# Altium footprint library Propia.PcbLib: 378 footprints (part 2 of 24)
Each footprint in its own frame and in the unit in brackets; x right, y up, seen from the top. Pads: shape width x height; smd on the part's side, far side on the other; paste and mask are expansions set on the pad; w line width, h text height; cw(c..) or ccw(c..) is an arc to the next point about the centre after c.
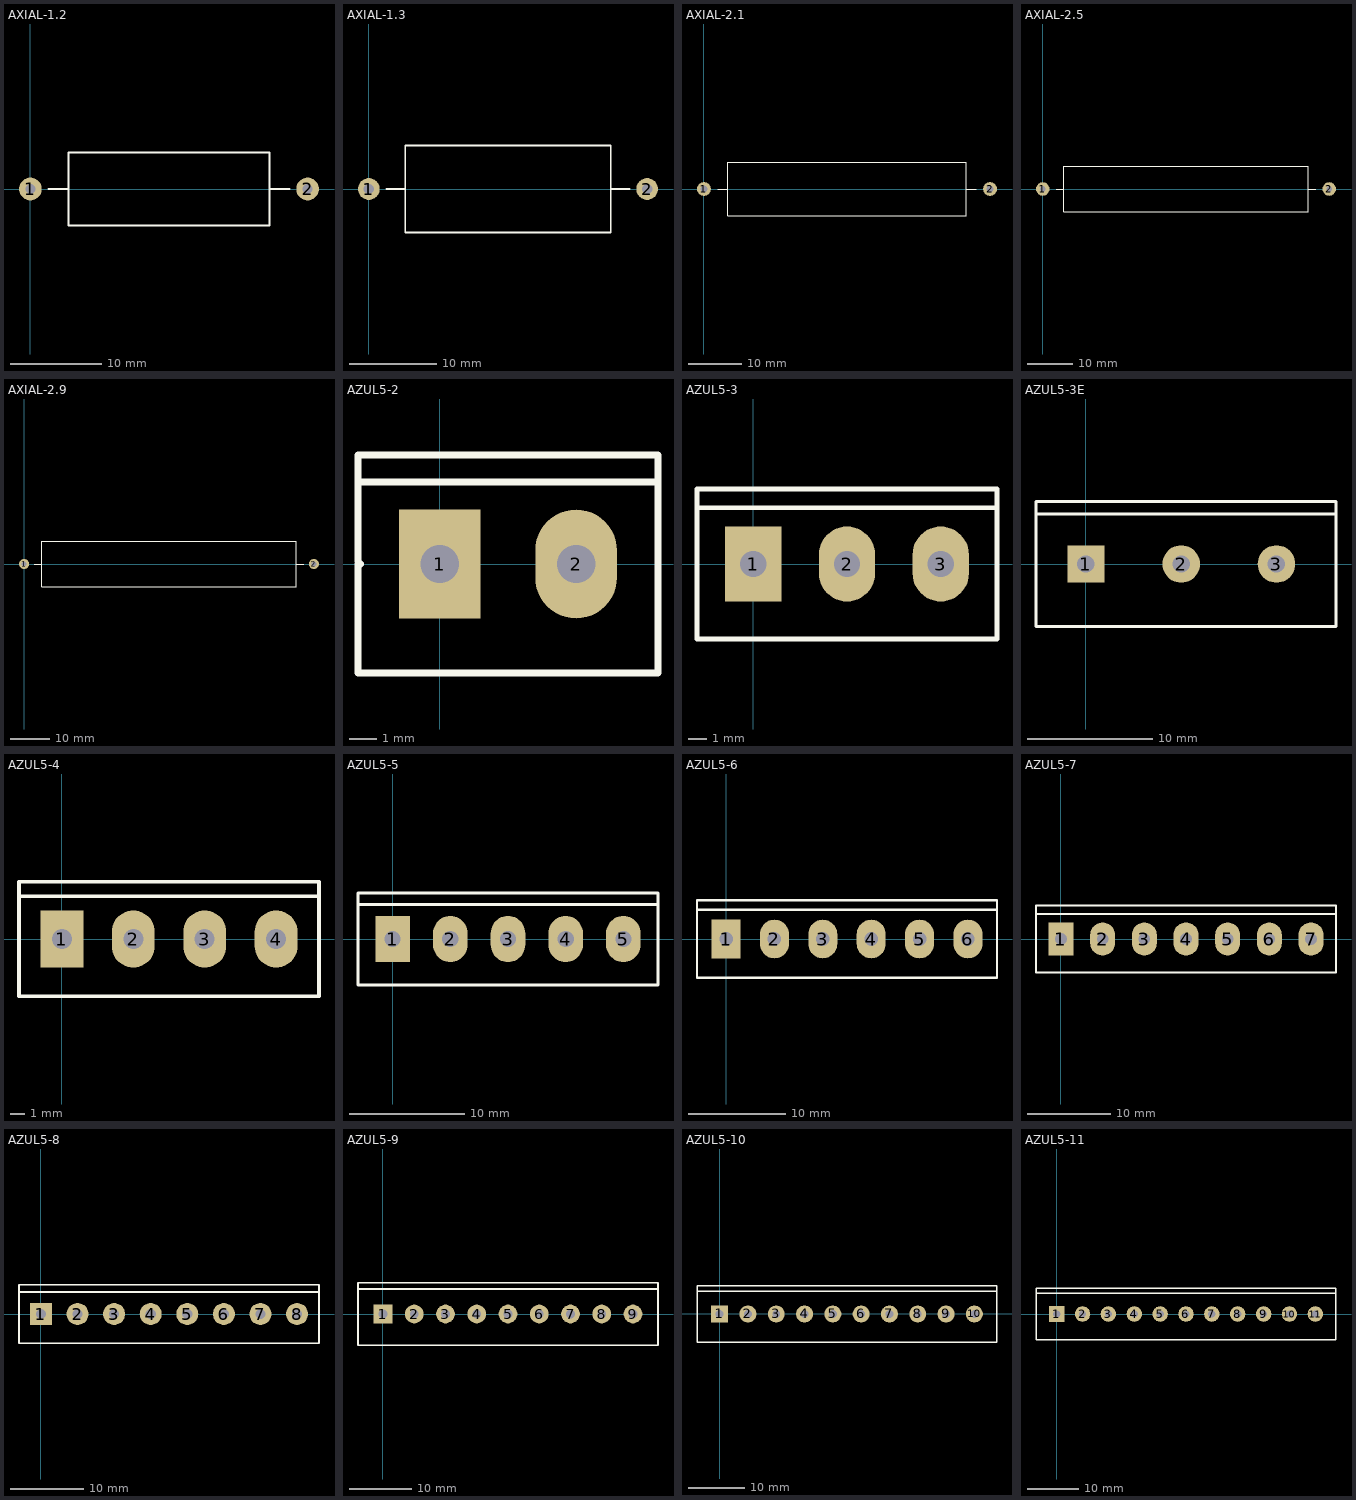
[diagram p1: the footprints below, top view; thin cyan lines are the x and y axes]

## AXIAL-1.2 [mm]
pads (2):
  round 2.5 hole 1.1: 1(0,0) 2(30.48,0)
TopOverlay:
  lines w0.2: 2,0 4.175,0 ; 26.305,0 28.48,0 ; 4.175,0 4.175,4 26.305,4 26.305,-4 4.175,-4 4.175,0

## AXIAL-1.3 [mm]
pads (2):
  round 2.5 hole 1.2: 1(0,0) 2(32,0)
TopOverlay:
  lines w0.2: 2,0 4.175,0 ; 27.825,0 30,0 ; 4.175,0 4.175,5 27.825,5 27.825,-5 4.175,-5 4.175,0

## AXIAL-2.1 [mm]
pads (2):
  round 2.6 hole 1.3: 1(0,0) 2(53.34,0)
TopOverlay:
  lines w0.2: 2.6,0 4.475,0 ; 48.865,0 50.74,0 ; 4.475,0 4.475,5 48.865,5 48.865,-5 4.475,-5 4.475,0

## AXIAL-2.5 [mm]
pads (2):
  round 3 hole 1.3: 1(0,0) 2(63.5,0)
TopOverlay:
  lines w0.2: 3,0 4.675,0 ; 58.825,0 60.5,0 ; 4.675,0 4.675,5 58.825,5 58.825,-5 4.675,-5 4.675,0

## AXIAL-2.9 [mm]
pads (2):
  round 2.6 hole 1.3: 1(0,0) 2(73.66,0)
TopOverlay:
  lines w0.2: 2.6,0 4.475,0 ; 69.185,0 71.06,0 ; 4.475,0 4.475,-5.75 69.185,-5.75 69.185,5.75 4.475,5.75 4.475,0

## AZUL5-2 [mm]
pads (2):
  rect 3x4 hole 1.4: 1(0,0)
  oval 3x4 hole 1.4: 2(5,0)
TopOverlay:
  lines w0.254: -3,0 -3,-4 8,-4 8,4 -3,4 -3,0.1 -2.9,0 ; -3,3 8,3

## AZUL5-3 [mm]
pads (3):
  rect 3x4 hole 1.4: 1(0,0)
  oval 3x4 hole 1.4: 2(5,0) 3(10,0)
TopOverlay:
  lines w0.254: -3,3 13,3 ; -3,-4 13,-4 13,4 -3,4 -3,0 -3,-4

## AZUL5-3E [mm]
pads (3):
  rect 3x3 hole 1.4: 1(0,0)
  round 3 hole 1.4: 2(7.62,0) 3(15.24,0)
TopOverlay:
  lines w0.254: -4,-0.01 -4,5 20,5 20,-5 -4,-5 -4,0 ; -4,4 20,4

## AZUL5-4 [mm]
pads (4):
  rect 3x4 hole 1.4: 1(0,0)
  oval 3x4 hole 1.4: 2(5,0) 3(10,0) 4(15,0)
TopOverlay:
  lines w0.254: -3,3 18,3 ; -3,-4 -3,0 -3,4 18,4 18,-4 -3,-4

## AZUL5-5 [mm]
pads (5):
  rect 3x4 hole 1.4: 1(0,0)
  oval 3x4 hole 1.4: 2(5,0) 3(10,0) 4(15,0) 5(20,0)
TopOverlay:
  lines w0.254: -3,3 23,3 ; -3,-4 -3,0 -3,4 23,4 23,-4 -3,-4

## AZUL5-6 [mm]
pads (6):
  rect 3x4 hole 1.4: 1(0,0)
  oval 3x4 hole 1.4: 2(5,0) 3(10,0) 4(15,0) 5(20,0) 6(25,0)
TopOverlay:
  lines w0.254: -3,3 28,3 ; -3,-4 28,-4 28,4 -3,4 -3,0 -3,-4

## AZUL5-7 [mm]
pads (7):
  rect 3x4 hole 1.4: 1(0,0)
  oval 3x4 hole 1.4: 2(5,0) 3(10,0) 4(15,0) 5(20,0) 6(25,0) 7(30,0)
TopOverlay:
  lines w0.254: -3,3 33,3 ; -3,-4 33,-4 33,4 -3,4 -3,0 -3,-4

## AZUL5-8 [mm]
pads (8):
  rect 3x3 hole 1.4: 1(0,0)
  round 3 hole 1.4: 2(5,0) 3(10,0) 4(15,0) 5(20,0) 6(25,0) 7(30,0) 8(35,0)
TopOverlay:
  lines w0.254: -3,-0.11 -3,4 38,4 38,2.03 38,-4 -3,-4 -3,0 ; -3,3 37.96,3

## AZUL5-9 [mm]
pads (9):
  rect 3x3 hole 1.4: 1(0,0)
  round 3 hole 1.4: 2(5,0) 3(10,0) 4(15,0) 5(20,0) 6(25,0) 7(30,0) 8(35,0) 9(40,0)
TopOverlay:
  lines w0.254: -4,-0.06 -4,5 44,5 44,-5 -4,-5 -4,0 ; -3.98,4 44,4

## AZUL5-10 [mm]
pads (10):
  rect 3x3 hole 1.4: 1(0,0)
  round 3 hole 1.4: 2(5,0) 3(10,0) 4(15,0) 5(20,0) 6(25,0) 7(30,0) 8(35,0) 9(40,0) 10(45,0)
TopOverlay:
  lines w0.254: -4,-0.06 -4,5 49,5 49,-5 -4,-5 -4,0 ; -4,4 49,4

## AZUL5-11 [mm]
pads (11):
  rect 3x3 hole 1.4: 1(0,0)
  round 3 hole 1.4: 2(5,0) 3(10,0) 4(15,0) 5(20,0) 6(25,0) 7(30,0) 8(35,0) 9(40,0) 10(45,0) 11(50,0)
TopOverlay:
  lines w0.254: -4,-0.06 -4,5 54,5 54,-5 -4,-5 -4,0 ; -4,4 53.9,4